# Altium footprint library FootPrintLib_11.PcbLib: 376 footprints (part 13 of 24)
Each footprint in its own frame and in the unit in brackets; x right, y up, seen from the top. Pads: shape width x height; smd on the part's side, far side on the other; paste and mask are expansions set on the pad; w line width, h text height; cw(c..) or ccw(c..) is an arc to the next point about the centre after c.
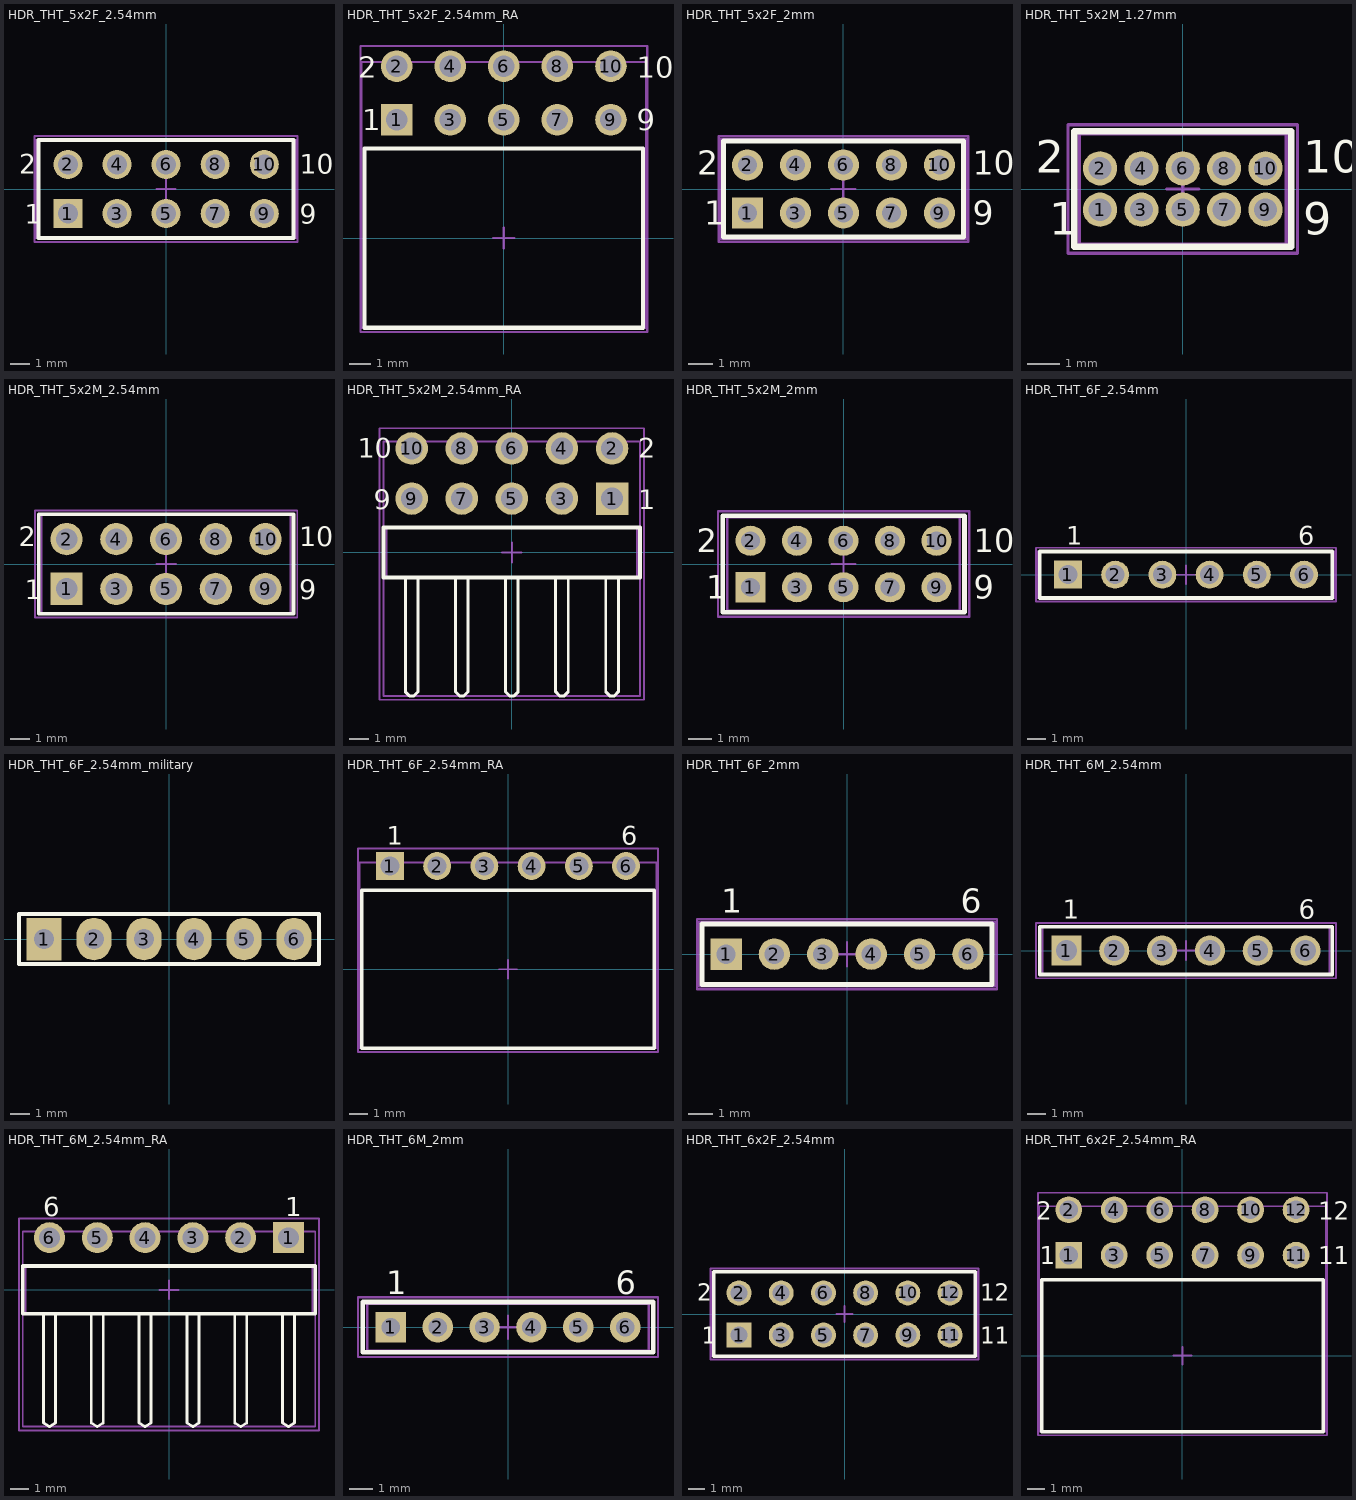
[diagram p12: the footprints below, top view; thin cyan lines are the x and y axes]

## HDR_THT_5x2F_2.54mm [mm] "Socket Header, Pitch 2.54 mm, THT, Vertical, dual row, 10p"
height 8.4
pads (10):
  rect 1.5x1.5 hole 1.02: 1(-5.08,-1.27)
  round 1.5 hole 1.02: 2(-5.08,1.27) 3(-2.54,-1.27) 4(-2.54,1.27) 5(0,-1.27) 6(0,1.27) 7(2.54,-1.27) 8(2.54,1.27) 9(5.08,-1.27) 10(5.08,1.27)
Top Overlay:
  lines w0.2: -6.6,-2.54 -6.6,2.54 6.6,2.54 6.6,-2.54 -6.6,-2.54
  text "2" at -7.61,0.8 h1
  text "1" at -7.31,-1.8 h1
  text "9" at 6.91,-1.8 h1
  text "10" at 6.91,0.8 h1
Mechanical 11:
  lines w0.1: -6.6,-2.54 6.6,-2.54 6.6,2.54 -6.6,2.54 -6.6,-2.54
Mechanical 13:
  lines w0.1: -6.725,-2.54 -6.725,2.54 6.725,2.54 6.725,-2.54 -6.725,-2.54
Mechanical 15:
  lines w0.1: -0.5,0 0.5,0 ; 0,-0.5 0,0.5 ; -6.8,-2.74 -6.8,2.74 6.8,2.74 6.8,-2.74 -6.8,-2.74
3D body "61301021821.stp": height 8.45, standoff -3.05, extent -6.6,-2.54 6.6,2.54

## HDR_THT_5x2F_2.54mm_RA [mm] "Socket Header, Pitch 2.54 mm, THT, Angled, dual row, 10p"
height 5.08
pads (10):
  rect 1.5x1.5 hole 1.02: 1(-5.08,5.61)
  round 1.5 hole 1.02: 2(-5.08,8.15) 3(-2.54,5.61) 4(-2.54,8.15) 5(0,5.61) 6(0,8.15) 7(2.54,5.61) 8(2.54,8.15) 9(5.08,5.61) 10(5.08,8.15)
Top Overlay:
  lines w0.2: -6.6,-4.25 -6.6,4.25 6.6,4.25 6.6,-4.25 -6.6,-4.25
  text "9" at 6.31,5.1 h1
  text "10" at 6.31,7.6 h1
  text "2" at -6.91,7.6 h1
  text "1" at -6.71,5.1 h1
Mechanical 11:
  lines w0.1: -6.6,-4.25 6.6,-4.25 6.6,4.25 -6.6,4.25 -6.6,-4.25
Mechanical 13:
  lines w0.1: -6.75,-4.25 6.75,-4.25 6.75,8.35 -6.75,8.35 -6.75,-4.25
Mechanical 15:
  lines w0.1: -0.5,0 0.5,0 ; 0,-0.5 0,0.5 ; -6.8,-4.45 6.8,-4.45 6.8,9.1 -6.8,9.1 -6.8,-4.45
3D body "613010243121.stp": height 5.05, standoff -3.25, extent -6.6,-4.25 6.6,8.35

## HDR_THT_5x2F_2mm [mm] "Socket Header, Pitch 2.00 mm, THT, Vertical, dual row, 10p"
height 4.45
pads (10):
  rect 1.3x1.3 hole 0.8: 1(-4,-1)
  round 1.3 hole 0.8: 2(-4,1) 3(-2,-1) 4(-2,1) 5(0,-1) 6(0,1) 7(2,-1) 8(2,1) 9(4,-1) 10(4,1)
Top Overlay:
  lines w0.2: -5,-2 5,-2 5,2 -5,2 -5,-2
  text "2" at -6.1,0.6 h1
  text "1" at -5.8,-1.5 h1
  text "10" at 5.4,0.6 h1
  text "9" at 5.4,-1.5 h1
Mechanical 11:
  lines w0.1: -5,-2 5,-2 5,2 -5,2 -5,-2
Mechanical 13:
  lines w0.1: -5.15,-2.075 5.15,-2.075 5.15,2.075 -5.15,2.075 -5.15,-2.075
Mechanical 15:
  lines w0.1: -0.5,0 0.5,0 ; 0,-0.5 0,0.5 ; -5.2,-2.2 5.2,-2.2 5.2,2.2 -5.2,2.2 -5.2,-2.2
3D body "62001021821.stp": height 4.35, standoff -2.35, extent -5.25,-2 5.25,2

## HDR_THT_5x2M_1.27mm [mm] "Pin Header, pitch 1.27 mm, THT, Vertical, dual row, 10p"
height 5.65
pads (10):
  round 1.05 hole 0.7: 1(-2.54,-0.635) 2(-2.54,0.635) 3(-1.27,-0.635) 4(-1.27,0.635) 5(0,-0.635) 6(0,0.635) 7(1.27,-0.635) 8(1.27,0.635) 9(2.54,-0.635) 10(2.54,0.635)
Top Overlay:
  lines w0.2: -3.325,-1.775 3.325,-1.775 3.325,1.775 -3.325,1.775 -3.325,-1.775
  text "2" at -4.505,0.5 h1
  text "1" at -4.105,-1.4 h1
  text "9" at 3.705,-1.4 h1
  text "10" at 3.705,0.5 h1
Mechanical 11:
  lines w0.1: -3.175,-1.7 3.175,-1.7 3.175,1.7 -3.175,1.7 -3.175,-1.7
Mechanical 13:
  lines w0.1: -3.325,-1.775 3.325,-1.775 3.325,1.775 -3.325,1.775 -3.325,-1.775
Mechanical 15:
  lines w0.1: -0.5,0 0.5,0 ; 0,-0.5 0,0.5 ; -3.525,-1.975 -3.525,1.975 3.525,1.975 3.525,-1.975 -3.525,-1.975
3D body "62201021121.stp": height 5.33, standoff -2.27, extent -3.175,-1.7 3.175,1.7

## HDR_THT_5x2M_2.54mm [mm] "Pin Header, pitch 2.54 mm, THT, Vertical, dual row, 10p"
height 8.54
pads (10):
  rect 1.65x1.65 hole 1.1: 1(-5.08,-1.27)
  round 1.65 hole 1.1: 2(-5.08,1.27) 3(-2.54,-1.27) 4(-2.54,1.27) 5(0,-1.27) 6(0,1.27) 7(2.54,-1.27) 8(2.54,1.27) 9(5.08,-1.27) 10(5.08,1.27)
Top Overlay:
  lines w0.2: -6.5,-2.54 -6.5,2.54 6.5,2.54 6.5,-2.54 -6.5,-2.54
  text "10" at 6.81,0.9 h1
  text "9" at 6.81,-1.8 h1
  text "2" at -7.51,0.9 h1
  text "1" at -7.21,-1.8 h1
Mechanical 11:
  lines w0.1: -6.35,-2.54 -6.35,2.54 6.35,2.54 6.35,-2.54 -6.35,-2.54
Mechanical 13:
  lines w0.1: -6.5,-2.54 -6.5,2.54 6.5,2.54 6.5,-2.54 -6.5,-2.54
Mechanical 15:
  lines w0.1: -0.5,0 0.5,0 ; 0,-0.5 0,0.5 ; -6.7,-2.74 -6.7,2.74 6.7,2.74 6.7,-2.74 -6.7,-2.74
3D body "61301021121.stp": height 8.59, standoff -2.95, extent -6.35,-2.54 6.35,2.54

## HDR_THT_5x2M_2.54mm_RA [mm] "Pin Header, pitch 2.54 mm, THT, Angled, dual row, 10p"
height 5.08
pads (10):
  rect 1.65x1.65 hole 1.1: 1(5.08,2.73)
  round 1.65 hole 1.1: 2(5.08,5.27) 3(2.54,2.73) 4(2.54,5.27) 5(0,2.73) 6(0,5.27) 7(-2.54,2.73) 8(-2.54,5.27) 9(-5.08,2.73) 10(-5.08,5.27)
Top Overlay:
  lines w0.15: -5.4,-1.335 -5.4,-7.07 -5.2,-7.27 -4.96,-7.27 -4.76,-7.07 -4.76,-1.31 ; -2.86,-1.335 -2.86,-7.07 -2.66,-7.27 -2.42,-7.27 -2.22,-7.07 -2.22,-1.31 ; -0.32,-1.335 -0.32,-7.07 -0.12,-7.27 0.12,-7.27 0.32,-7.07 0.32,-1.31 ; 2.22,-1.335 2.22,-7.07 2.42,-7.27 2.66,-7.27 2.86,-7.07 2.86,-1.31 ; 4.76,-1.335 4.76,-7.07 4.96,-7.27 5.2,-7.27 5.4,-7.07 5.4,-1.31
  lines w0.2: -6.5,-1.27 6.5,-1.27 6.5,1.27 -6.5,1.27 -6.5,-1.27
  text "9" at -7.01,2.2 h1
  text "10" at -7.8,4.8 h1
  text "2" at 6.41,4.8 h1
  text "1" at 6.41,2.2 h1
Mechanical 11:
  lines w0.1: -6.35,-1.27 6.35,-1.27 6.35,1.27 -6.35,1.27 -6.35,-1.27
Mechanical 13:
  lines w0.1: -6.5,-7.27 -6.5,5.63 6.5,5.63 6.5,-7.27 -6.5,-7.27
Mechanical 15:
  lines w0.1: -0.5,0 0.5,0 ; 0,-0.5 0,0.5 ; -6.7,-7.47 -6.7,6.295 6.7,6.295 6.7,-7.47 -6.7,-7.47
3D body "61301021021.stp": height 5.14, standoff -2.94, extent -6.35,-7.27 6.35,5.63

## HDR_THT_5x2M_2mm [mm] "Pin Header, pitch 2.00 mm, THT, Vertical, dual row, 10p"
height 6
pads (10):
  rect 1.3x1.3 hole 0.8: 1(-4,-1)
  round 1.3 hole 0.8: 2(-4,1) 3(-2,-1) 4(-2,1) 5(0,-1) 6(0,1) 7(2,-1) 8(2,1) 9(4,-1) 10(4,1)
Top Overlay:
  lines w0.2: -5.2,-2.075 -5.2,2.075 5.2,2.075 5.2,-2.075 -5.2,-2.075
  text "1" at -5.9,-1.5 h1
  text "2" at -6.3,0.5 h1
  text "9" at 5.6,-1.5 h1
  text "10" at 5.6,0.5 h1
Mechanical 11:
  lines w0.1: -5,-2 -5,2 5,2 5,-2 -5,-2
Mechanical 13:
  lines w0.1: -5.2,-2.075 -5.2,2.075 5.2,2.075 5.2,-2.075 -5.2,-2.075
Mechanical 15:
  lines w0.1: -0.5,0 0.5,0 ; 0,-0.5 0,0.5 ; -5.4,-2.275 -5.4,2.275 5.4,2.275 5.4,-2.275 -5.4,-2.275
3D body "62001021121.stp": height 6.05, standoff -2.65, extent -5,-2 5,2

## HDR_THT_6F_2.54mm [mm] "Socket Header, Pitch 2.54 mm, THT, Vertical, single row, 6p"
height 8.5
pads (6):
  rect 1.5x1.5 hole 1.02: 1(-6.35,0)
  round 1.5 hole 1.02: 2(-3.81,0) 3(-1.27,0) 4(1.27,0) 5(3.81,0) 6(6.35,0)
Top Overlay:
  lines w0.2: -7.87,-1.25 7.87,-1.25 7.87,1.25 -7.87,1.25 -7.87,-1.25
  text "1" at -6.44,1.6 h1
  text "6" at 6.04,1.6 h1
Mechanical 11:
  lines w0.1: -7.87,-1.25 7.87,-1.25 7.87,1.25 -7.87,1.25 -7.87,-1.25
Mechanical 13:
  lines w0.1: -7.995,-1.25 -7.995,1.25 7.995,1.25 7.995,-1.25 -7.995,-1.25
Mechanical 15:
  lines w0.1: -0.5,0 0.5,0 ; 0,-0.5 0,0.5 ; -8.07,-1.45 -8.07,1.45 8.07,1.45 8.07,-1.45 -8.07,-1.45
3D body "61300611821.stp": height 8.55, standoff -3.06, extent -7.87,-1.25 7.87,1.25

## HDR_THT_6F_2.54mm_military [mil] "Pin Header, pitch 2.54 mm, THT, Vertical, single row, 6p"
pads (6):
  rect 70x85 hole 39.37: 1(-250,0)
  oval 70x85 hole 39.37: 2(-150,0) 3(-50,0) 4(50,0) 5(150,0) 6(250,0)
Top Overlay:
  lines w7.87: -300,-50 -300,50 300,50 300,-50 -300,-50
3D body "User Library-RM254_4pin.STEP": height 237.01, standoff -122.05, extent -100,-51.97 300,48.03
3D body "User Library-RM254_4pin.STEP": height 237.01, standoff -122.05, extent -300,-51.97 100,48.03

## HDR_THT_6F_2.54mm_RA [mm] "Socket Header, Pitch 2.54 mm, THT, Angled, single row, 6p"
height 2.5
pads (6):
  rect 1.5x1.5 hole 1.02: 1(-6.35,5.55)
  round 1.5 hole 1.02: 2(-3.81,5.55) 3(-1.27,5.55) 4(1.27,5.55) 5(3.81,5.55) 6(6.35,5.55)
Top Overlay:
  lines w0.2: -7.87,-4.25 -7.87,4.25 7.87,4.25 7.87,-4.25 -7.87,-4.25
  text "6" at 6.09,6.7 h1
  text "1" at -6.51,6.7 h1
Mechanical 11:
  lines w0.1: -7.87,-4.25 7.87,-4.25 7.87,4.25 -7.87,4.25 -7.87,-4.25
Mechanical 13:
  lines w0.1: -7.995,-4.25 -7.995,5.75 7.995,5.75 7.995,-4.25 -7.995,-4.25
Mechanical 15:
  lines w0.1: -0.5,0 0.5,0 ; 0,-0.5 0,0.5 ; -8.07,-4.45 -8.07,6.5 8.07,6.5 8.07,-4.45 -8.07,-4.45
3D body "613006143121.stp": height 2.55, standoff -3.04, extent -7.87,-4.25 7.87,5.75

## HDR_THT_6F_2mm [mm] "Socket Header, Pitch 2.00 mm, THT, Vertical, single row, 6p"
height 4.45
pads (6):
  rect 1.3x1.3 hole 0.8: 1(-5,0)
  round 1.3 hole 0.8: 2(-3,0) 3(-1,0) 4(1,0) 5(3,0) 6(5,0)
Top Overlay:
  lines w0.2: -6,-1.25 6,-1.25 6,1.25 -6,1.25 -6,-1.25
  text "6" at 4.7,1.7 h1
  text "1" at -5.2,1.7 h1
Mechanical 11:
  lines w0.1: -6,-1.25 6,-1.25 6,1.25 -6,1.25 -6,-1.25
Mechanical 13:
  lines w0.1: -6.15,-1.325 6.15,-1.325 6.15,1.325 -6.15,1.325 -6.15,-1.325
Mechanical 15:
  lines w0.1: -0.5,0 0.5,0 ; 0,-0.5 0,0.5 ; -6.2,-1.45 6.2,-1.45 6.2,1.45 -6.2,1.45 -6.2,-1.45
3D body "62000611821.stp": height 4.35, standoff -2.65, extent -6.25,-1.25 6.25,1.25

## HDR_THT_6M_2.54mm [mm] "Pin Header, pitch 2.54 mm, THT, Vertical, single row, 6p"
height 8.54
pads (6):
  rect 1.6x1.6 hole 1.1: 1(-6.35,0)
  round 1.6 hole 1.1: 2(-3.81,0) 3(-1.27,0) 4(1.27,0) 5(3.81,0) 6(6.35,0)
Top Overlay:
  lines w0.2: -7.77,-1.27 7.77,-1.27 7.77,1.27 -7.77,1.27 -7.77,-1.27
  text "1" at -6.54,1.7 h1
  text "6" at 6,1.7 h1
Mechanical 11:
  lines w0.1: -7.62,-1.27 -7.62,1.27 7.62,1.27 7.62,-1.27 -7.62,-1.27
Mechanical 13:
  lines w0.1: -7.77,-1.27 7.77,-1.27 7.77,1.27 -7.77,1.27 -7.77,-1.27
Mechanical 15:
  lines w0.1: -0.5,0 0.5,0 ; 0,-0.5 0,0.5 ; -7.97,-1.47 7.97,-1.47 7.97,1.47 -7.97,1.47 -7.97,-1.47
3D body "61300611121.stp": height 8.57, standoff -2.97, extent -7.62,-1.27 7.62,1.27

## HDR_THT_6M_2.54mm_RA [mm] "Pin Header, pitch 2.54 mm, THT, Angled, single row, 6p"
height 2.54
pads (6):
  rect 1.65x1.65 hole 1.1: 1(6.35,2.77)
  round 1.65 hole 1.1: 2(3.81,2.77) 3(1.27,2.77) 4(-1.27,2.77) 5(-3.81,2.77) 6(-6.35,2.77)
Top Overlay:
  lines w0.15: -6.67,-1.27 -6.67,-7.07 -6.35,-7.27 -6.03,-7.07 -6.03,-1.27 ; -4.13,-1.27 -4.13,-7.07 -3.81,-7.27 -3.49,-7.07 -3.49,-1.27 ; -1.59,-1.27 -1.59,-7.07 -1.27,-7.27 -0.95,-7.07 -0.95,-1.27 ; 0.95,-1.27 0.95,-7.07 1.27,-7.27 1.59,-7.07 1.59,-1.27 ; 3.49,-1.27 3.49,-7.07 3.81,-7.27 4.13,-7.07 4.13,-1.27 ; 6.03,-1.27 6.03,-7.07 6.35,-7.27 6.67,-7.07 6.67,-1.27
  lines w0.2: -7.77,-1.27 -7.77,1.27 7.77,1.27 7.77,-1.27 -7.77,-1.27
  text "1" at 6.18,3.9 h1
  text "6" at -6.67,3.9 h1
Mechanical 11:
  lines w0.1: -7.62,-1.27 -7.62,1.27 7.62,1.27 7.62,-1.27 -7.62,-1.27
Mechanical 13:
  lines w0.1: -7.77,-7.27 7.77,-7.27 7.77,3.09 -7.77,3.09 -7.77,-7.27
Mechanical 15:
  lines w0.1: -0.5,0 0.5,0 ; 0,-0.5 0,0.5 ; -7.97,-7.47 7.97,-7.47 7.97,3.795 -7.97,3.795 -7.97,-7.47
3D body "61300611021.stp": height 2.62, standoff -2.92, extent -7.62,-7.27 7.62,3.09

## HDR_THT_6M_2mm [mm] "Pin Header, pitch 2.00 mm, THT, Vertical, single row, 6p"
height 6.35
pads (6):
  rect 1.3x1.3 hole 0.8: 1(-5,0)
  round 1.3 hole 0.8: 2(-3,0) 3(-1,0) 4(1,0) 5(3,0) 6(5,0)
Top Overlay:
  lines w0.2: -6.2,-1.075 6.2,-1.075 6.2,1.075 -6.2,1.075 -6.2,-1.075
  text "1" at -5.2,1.4 h1
  text "6" at 4.6,1.4 h1
Mechanical 11:
  lines w0.1: -6,-1 -6,1 6,1 6,-1 -6,-1
Mechanical 13:
  lines w0.1: -6.2,-1.075 6.2,-1.075 6.2,1.075 -6.2,1.075 -6.2,-1.075
Mechanical 15:
  lines w0.1: -0.5,0 0.5,0 ; 0,-0.5 0,0.5 ; -6.4,-1.275 6.4,-1.275 6.4,1.275 -6.4,1.275 -6.4,-1.275
3D body "62000611121.stp": height 6.05, standoff -2.65, extent -6,-1 6,1

## HDR_THT_6x2F_2.54mm [mm] "Socket Header, Pitch 2.54 mm, THT, Vertical, dual row, 12p"
height 8.4
pads (12):
  rect 1.5x1.5 hole 1.02: 1(-6.35,-1.27)
  round 1.5 hole 1.02: 2(-6.35,1.27) 3(-3.81,-1.27) 4(-3.81,1.27) 5(-1.27,-1.27) 6(-1.27,1.27) 7(1.27,-1.27) 8(1.27,1.27) 9(3.81,-1.27) 10(3.81,1.27) 11(6.35,-1.27) 12(6.35,1.27)
Top Overlay:
  lines w0.2: -7.87,-2.54 -7.87,2.54 7.87,2.54 7.87,-2.54 -7.87,-2.54
  text "2" at -8.88,0.8 h1
  text "1" at -8.58,-1.8 h1
  text "11" at 8.18,-1.8 h1
  text "12" at 8.18,0.8 h1
Mechanical 11:
  lines w0.1: -7.87,-2.54 7.87,-2.54 7.87,2.54 -7.87,2.54 -7.87,-2.54
Mechanical 13:
  lines w0.1: -7.995,-2.54 -7.995,2.54 7.995,2.54 7.995,-2.54 -7.995,-2.54
Mechanical 15:
  lines w0.1: -0.5,0 0.5,0 ; 0,-0.5 0,0.5 ; -8.07,-2.74 -8.07,2.74 8.07,2.74 8.07,-2.74 -8.07,-2.74
3D body "61301221821.stp": height 8.45, standoff -3.05, extent -7.87,-2.54 7.87,2.54

## HDR_THT_6x2F_2.54mm_RA [mm] "Socket Header, Pitch 2.54 mm, THT, Angled, dual row, 12p"
height 5.08
pads (12):
  rect 1.5x1.5 hole 1.02: 1(-6.35,5.61)
  round 1.5 hole 1.02: 2(-6.35,8.15) 3(-3.81,5.61) 4(-3.81,8.15) 5(-1.27,5.61) 6(-1.27,8.15) 7(1.27,5.61) 8(1.27,8.15) 9(3.81,5.61) 10(3.81,8.15) 11(6.35,5.61) 12(6.35,8.15)
Top Overlay:
  lines w0.2: -7.87,-4.25 -7.87,4.25 7.87,4.25 7.87,-4.25 -7.87,-4.25
  text "2" at -8.18,7.6 h1
  text "1" at -7.98,5.1 h1
  text "12" at 7.58,7.6 h1
  text "11" at 7.58,5.1 h1
Mechanical 11:
  lines w0.1: -7.87,-4.25 7.87,-4.25 7.87,4.25 -7.87,4.25 -7.87,-4.25
Mechanical 13:
  lines w0.1: -8.02,-4.25 8.02,-4.25 8.02,8.35 -8.02,8.35 -8.02,-4.25
Mechanical 15:
  lines w0.1: -0.5,0 0.5,0 ; 0,-0.5 0,0.5 ; -8.07,-4.45 8.07,-4.45 8.07,9.1 -8.07,9.1 -8.07,-4.45
3D body "613012243121.stp": height 5.05, standoff -3.25, extent -7.87,-4.25 7.87,8.35